# Altium footprint library Footprints.PcbLib: 34 footprints (part 3 of 3)
Each footprint in its own frame and in the unit in brackets; x right, y up, seen from the top. Pads: shape width x height; smd on the part's side, far side on the other; paste and mask are expansions set on the pad; w line width, h text height; cw(c..) or ccw(c..) is an arc to the next point about the centre after c.
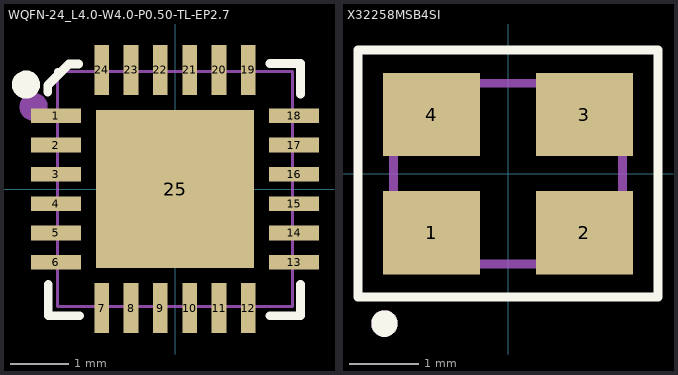
[diagram p2: the footprints below, top view; thin cyan lines are the x and y axes]

## WQFN-24_L4.0-W4.0-P0.50-TL-EP2.7 [mm]
pads (25):
  rect 0.85x0.25 smd: 1(-2.03,1.25) 2(-2.03,0.75) 3(-2.03,0.25) 4(-2.03,-0.25) 5(-2.03,-0.75) 6(-2.03,-1.25) 13(2.03,-1.25) 14(2.03,-0.75) 15(2.03,-0.25) 16(2.03,0.25) 17(2.03,0.75) 18(2.03,1.25)
  rect 0.25x0.85 smd: 7(-1.25,-2.03) 8(-0.75,-2.03) 9(-0.25,-2.03) 10(0.25,-2.03) 11(0.75,-2.03) 12(1.25,-2.03) 19(1.25,2.03) 20(0.75,2.03) 21(0.25,2.03) 22(-0.25,2.03) 23(-0.75,2.03) 24(-1.25,2.03)
  rect 2.7x2.7 smd: 25(0,0)
F.SilkS:
  circle w0.24: c-2.54,1.78 r0.12
  circle w0.06: c-2,2 r0.03
  lines w0.15: -2.17,1.65 -2.17,1.77 -1.81,2.13 -1.64,2.13 ; -2.16,-1.63 -2.16,-2.16 -1.63,-2.16 ; 1.62,-2.16 2.14,-2.16 2.14,-1.63 ; 1.62,2.14 2.14,2.14 2.14,1.62
Top Courtyard:
  lines w0.05: -2,-2 -2,2 2,2 2,-2 -2,-2
F.Fab:
  text "'.Designator'" at -4.047,-0.84 h1
Cmts.User:
  circle w0.24: c-2.41,1.4 r0.12
3D body "WQFN-24_L4.0-W4.0-P0.50-TL-EP2.7.step": height 0.73, standoff -0.05, extent -2.001,-2.001 2.001,2.001

## X32258MSB4SI [mm] "-40℃~+85℃ 180Ω 20pF 8MHz Crystal Oscillator ±10ppm ±20ppm SMD3225-4P Crystals ROHS"
pads (4):
  rect 1.4x1.2 smd: 1(-1.1,-0.85) 2(1.1,-0.85) 3(1.1,0.85) 4(-1.1,0.85)
F.SilkS:
  circle w0.254: c-1.778,-2.159 r0.064
  lines w0.127: -2.159,-1.778 2.159,-1.778 2.159,1.778 -2.159,1.778 -2.159,-1.778
Top Assembly:
  circle w0.254: c-1.778,-2.159 r0.064
  lines w0.127: -1.65,-1.3 1.65,-1.3 1.65,1.3 -1.65,1.3 -1.65,-1.3
3D body "CRYSTAL-SMD_4P-L3.2-W2.5-BL.step": height 0.7, standoff 0, extent -1.6,-1.25 1.6,1.25